# Altium footprint library LimeMicroAltiumLib.PcbLib: 876 footprints (part 46 of 57)
Each footprint in its own frame and in the unit in brackets; x right, y up, seen from the top. Pads: shape width x height; smd on the part's side, far side on the other; paste and mask are expansions set on the pad; w line width, h text height; cw(c..) or ccw(c..) is an arc to the next point about the centre after c.
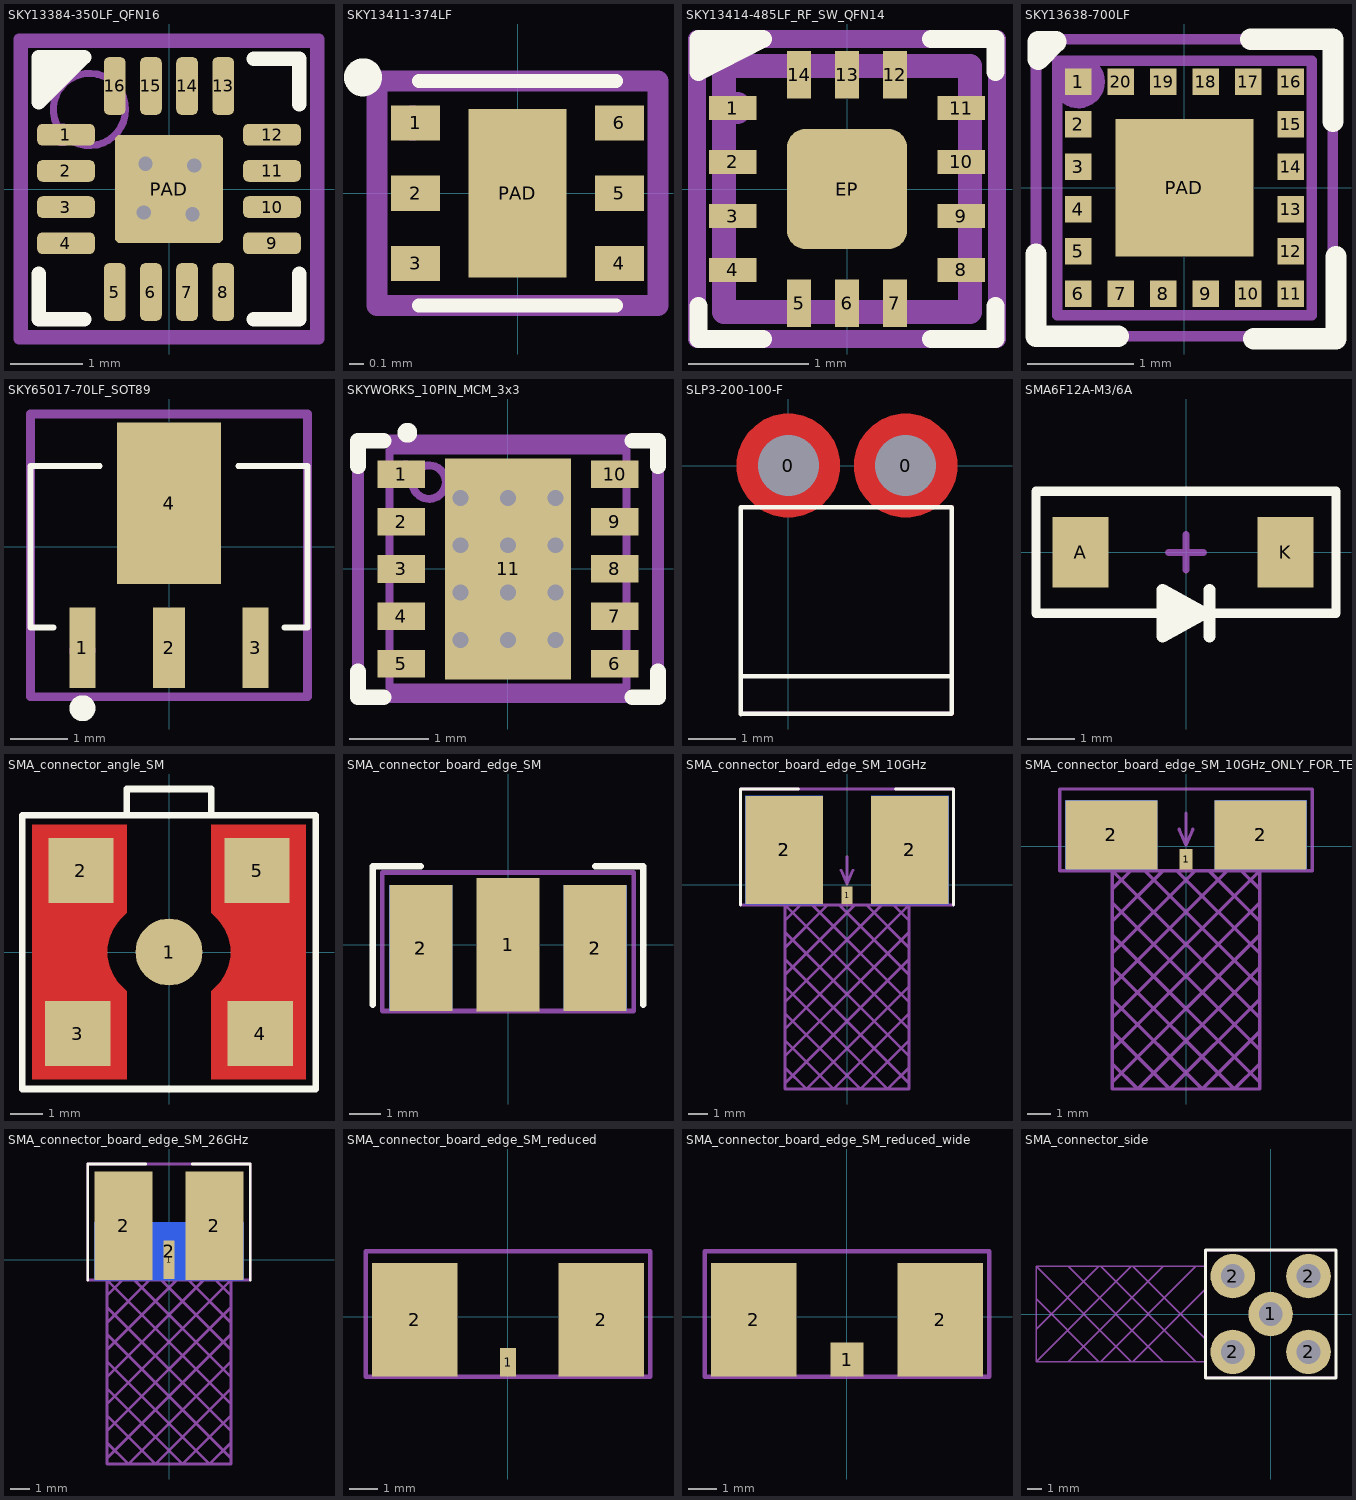
[diagram p45: the footprints below, top view; thin cyan lines are the x and y axes]

## SKY13384-350LF_QFN16 [mm]
pads (17):
  rrect50% 0.8x0.3 smd mask+0.05: 1(-1.425,0.75) 2(-1.425,0.25) 3(-1.425,-0.25) 4(-1.425,-0.75) 9(1.425,-0.75) 10(1.425,-0.25) 11(1.425,0.25) 12(1.425,0.75)
  rrect50% 0.3x0.8 smd mask+0.05: 5(-0.75,-1.425) 6(-0.25,-1.425) 7(0.25,-1.425) 8(0.75,-1.425) 13(0.75,1.425) 14(0.25,1.425) 15(-0.25,1.425) 16(-0.75,1.425)
  rrect10% 1.5x1.5 smd mask+0.05: PAD(0,0)
via -0.325,0.35 diameter 0.4 hole 0.2
via -0.35,-0.325 diameter 0.4 hole 0.2
via 0.325,-0.35 diameter 0.4 hole 0.2
via 0.35,0.325 diameter 0.4 hole 0.2
Top Overlay:
  region: -1.8,1.1 -1.075,1.825 -1.8,1.825
  lines w0.2: -1.8,-1.175 -1.8,-1.8 -1.175,-1.8 ; 1.175,-1.8 1.8,-1.8 1.8,-1.175 ; 1.175,1.8 1.8,1.8 1.8,1.175 ; -1.8,1.2 -1.175,1.825 -1.8,1.825 -1.8,1.2
Mechanical 13:
  circle w0.1: c-1.1,1.1 r0.5
  lines w0.1: -2,-2 -2,2 2,2 2,-2 -2,-2
Mechanical 15:
  circle w0.2: c-1.475,0.75 r0.056
  lines w0.15: -0.5,0 0.5,0 ; 0,-0.5 0,0.5 ; -2.075,-2.075 -2.075,2.075 2.075,2.075 2.075,-2.075 -2.075,-2.075
  text ".Designator" at 0,0 h0.55
3D body "User Library-qfn16-3x3.step": height 0.92, standoff 0, extent -1.5,-1.5 1.5,1.5

## SKY13411-374LF [mm]
pads (7):
  rect 0.35x0.25 smd mask+0.05: 1(-0.725,0.5) 2(-0.725,0) 3(-0.725,-0.5) 4(0.725,-0.5) 5(0.725,0) 6(0.725,0.5)
  rect 0.7x1.2 smd mask+0.05: PAD(0,0)
Top Overlay:
  circle w0.2: c-1.1,0.825 r0.035
  lines w0.1: -0.7,-0.8 0.7,-0.8 ; -0.7,0.8 0.7,0.8
Mechanical 15:
  circle w0.2: c-0.75,0.5 r0.025
  lines w0.15: -0.2,0 0.2,0 ; 0,-0.2 0,0.2 ; -1,-0.8 -1,0.8 1,0.8 1,-0.8 -1,-0.8
  text ".Designator" at 0,0 h0.55
3D body "User Library-DFN 6 2x2_v2.STEP": height 0.48, standoff -0.03, extent -0.752,-0.75 0.751,0.75

## SKY13414-485LF_RF_SW_QFN14 [mm]
pads (15):
  rect 0.395x0.2 smd paste+0 mask+0.05: 1(-0.953,0.675) 2(-0.953,0.225) 3(-0.953,-0.225) 4(-0.953,-0.675) 8(0.953,-0.675) 9(0.953,-0.225) 10(0.953,0.225) 11(0.953,0.675)
  rect 0.2x0.395 smd paste+0 mask+0.05: 5(-0.4,-0.953) 6(0,-0.953) 7(0.4,-0.953) 12(0.4,0.953) 13(0,0.953) 14(-0.4,0.953)
  rrect30% 1x1 smd paste+0 mask+0.05: EP(0,0)
Top Overlay:
  region: -1.237,0.975 -1.237,1.25 -0.7,1.25
  lines w0.15: -1.237,-0.975 -1.237,-1.25 -0.7,-1.25 ; 0.7,-1.25 1.237,-1.25 1.237,-0.975 ; 0.7,1.25 1.237,1.25 1.237,0.975 ; -1.237,0.975 -0.7,1.25 -1.237,1.25 -1.237,0.975
Mechanical 13:
  lines w0.2: -1.025,-1.025 1.025,-1.025 1.025,1.025 -1.025,1.025 -1.025,-1.025
Mechanical 15:
  circle w0.2: c-0.925,0.675 r0.035
  lines w0.15: -0.375,0 0,0 ; 0,-0.375 0,0 ; 0,0.375 0,0 ; 0.375,0 0,0 ; -1.25,-1.25 1.25,-1.25 1.25,1.25 -1.25,1.25 -1.25,-1.25
  text ".Designator" at 0,0 h0.55
3D body "IC_Skyworks_Solutions_SKY13414-485LF_eec.STEP": height 0.25, standoff 0, extent -1.25,-1.25 1.25,1.25

## SKY13638-700LF [mm] "QFN, 20-Leads, Body 4,00x4,00mm, Pitch 0,50mm, Thermal Pad 2,70x2,70mm, IPC Medium Density"
height 0.8
pads (21):
  rect 0.25x0.25 smd mask+0.025: 1(-1,1) 2(-1,0.6) 3(-1,0.2) 4(-1,-0.2) 5(-1,-0.6) 6(-1,-1) 7(-0.6,-1) 8(-0.2,-1) 9(0.2,-1) 10(0.6,-1) 11(1,-1) 12(1,-0.6) 13(1,-0.2) 14(1,0.2) 15(1,0.6) 16(1,1) 17(0.6,1) 18(0.2,1) 19(-0.2,1) 20(-0.6,1)
  rect 1.3x1.3 smd mask+0.05: PAD(0,0)
Top Overlay:
  lines w0.2: -1.4,-0.625 -1.4,-1.4 -0.625,-1.4 ; 0.625,1.4 1.4,1.4 1.4,0.625 ; 0.654,-1.422 1.429,-1.422 1.429,-0.647 ; -1.378,1.213 -1.378,1.378 -1.213,1.378 -1.378,1.213
Mechanical 13:
  circle w0.1: c-1,1 r0.2
  lines w0.1: -1.2,-1.2 -1.2,1.2 1.2,1.2 1.2,-1.2 -1.2,-1.2
Mechanical 15:
  circle w0.35: c-1,1 r0.035
  lines w0.1: -0.5,0 0.5,0 ; 0,-0.5 0,0.5 ; -1.4,-1.4 -1.4,1.4 1.4,1.4 1.4,-1.4 -1.4,-1.4
  text ".Designator" at 0,0 h0.55
3D body: height 0.4, standoff 0, extent -1.2,-1.2 1.2,1.2

## SKY65017-70LF_SOT89 [mm]
pads (4):
  rect 0.45x1.4 smd mask+0.05: 1(-1.5,-1.75) 3(1.5,-1.75)
  rect 0.55x1.4 smd mask+0.05: 2(0,-1.75)
  rect 1.8x2.8 smd mask+0.05: 4(0,0.75)
Top Overlay:
  circle w0.25: c-1.5,-2.8 r0.1
  lines w0.1: -2,-1.4 -2.4,-1.4 -2.4,1.4 -1.2,1.4 ; 1.2,1.4 2.4,1.4 2.4,-1.4 2,-1.4
Mechanical 15:
  circle w0.25: c-1.5,-1.8 r0.1
  lines w0.15: -0.2,0 0.2,0 ; 0,-0.2 0,0.2 ; -2.4,-2.6 2.4,-2.6 2.4,2.3 -2.4,2.3 -2.4,-2.6
  text ".Designator" at 0,0 h0.55
3D body "SW3dPS-SOT89.STEP": height 1.59, standoff -0.02, extent -2.314,-2.258 2.286,1.992

## SKYWORKS_10PIN_MCM_3x3 [mm]
height 0.8
pads (11):
  rect 0.6x0.35 smd mask+0.05: 1(-1.35,1.2) 2(-1.35,0.6) 3(-1.35,0) 4(-1.35,-0.6) 5(-1.35,-1.2) 6(1.35,-1.2) 7(1.35,-0.6) 8(1.35,0) 9(1.35,0.6) 10(1.35,1.2)
  rect 1.6x2.8 smd mask+0.05: 11(0,0)
via -0.6,-0.9 diameter 0.4 hole 0.2
via 0,-0.9 diameter 0.4 hole 0.2
via 0.6,-0.9 diameter 0.4 hole 0.2
via -0.6,-0.3 diameter 0.4 hole 0.2
via 0.6,-0.3 diameter 0.4 hole 0.2
via 0,-0.3 diameter 0.4 hole 0.2
via -0.6,0.3 diameter 0.4 hole 0.2
via 0,0.3 diameter 0.4 hole 0.2
via 0.6,0.3 diameter 0.4 hole 0.2
via -0.6,0.9 diameter 0.4 hole 0.2
via 0,0.9 diameter 0.4 hole 0.2
via 0.6,0.9 diameter 0.4 hole 0.2
Top Overlay:
  circle w0.2: c-1.275,1.725 r0.025
  lines w0.2: -1.9,-1.3 -1.9,-1.625 -1.575,-1.625 ; -1.9,1.3 -1.9,1.625 -1.575,1.625 ; 1.575,-1.625 1.9,-1.625 1.9,-1.3 ; 1.575,1.625 1.9,1.625 1.9,1.3
Mechanical 13:
  circle w0.1: c-1,1.1 r0.212
  lines w0.1: -1.5,-1.5 1.5,-1.5 1.5,1.5 -1.5,1.5 -1.5,-1.5
Mechanical 15:
  circle w0.35: c-1.3,1.2 r0
  lines w0.15: -0.5,0 0.5,0 ; 0,-0.5 0,0.5 ; -1.9,-1.625 1.9,-1.625 1.9,1.625 -1.9,1.625 -1.9,-1.625
  text ".Designator" at 0,0 h0.55
3D body: height 0.9, standoff 0, extent -1.5,-1.5 1.5,1.5

## SLP3-200-100-F [mm]
pads (2):
  round 0.9 hole 1.3 unplated: 0(0,0) 0(2.5,0)
Top Layer:
  pour cut-out: 0,0 0,1.1 0.108,1.1 0.321,1.058 0.521,0.975 0.701,0.854 0.854,0.701 0.975,0.521 1.058,0.321 1.1,0.108 1.1,0
  pour cut-out: 0,0 0,-1.1 -0.108,-1.1 -0.321,-1.058 -0.521,-0.975 -0.701,-0.854 -0.854,-0.701 -0.975,-0.521 -1.058,-0.321 -1.1,-0.108 -1.1,0
  pour cut-out: 0,0 -1.1,0 -1.1,0.108 -1.058,0.321 -0.975,0.521 -0.854,0.701 -0.701,0.854 -0.521,0.975 -0.321,1.058 -0.108,1.1 0,1.1
  pour cut-out: 0,0 1.1,0 1.1,-0.108 1.058,-0.321 0.975,-0.521 0.854,-0.701 0.701,-0.854 0.521,-0.975 0.321,-1.058 0.108,-1.1 0,-1.1
  pour cut-out: 2.5,0 2.5,1.1 2.608,1.1 2.821,1.058 3.021,0.975 3.201,0.854 3.354,0.701 3.475,0.521 3.558,0.321 3.6,0.108 3.6,0
  pour cut-out: 2.5,0 2.5,-1.1 2.392,-1.1 2.179,-1.058 1.979,-0.975 1.799,-0.854 1.646,-0.701 1.525,-0.521 1.442,-0.321 1.4,-0.108 1.4,0
  pour cut-out: 2.5,0 1.4,0 1.4,0.108 1.442,0.321 1.525,0.521 1.646,0.701 1.799,0.854 1.979,0.975 2.179,1.058 2.392,1.1 2.5,1.1
  pour cut-out: 2.5,0 3.6,0 3.6,-0.108 3.558,-0.321 3.475,-0.521 3.354,-0.701 3.201,-0.854 3.021,-0.975 2.821,-1.058 2.608,-1.1 2.5,-1.1
Top Overlay:
  lines w0.1: -1.016,-4.5 3.484,-4.489 3.484,-0.889 -1.016,-0.889 -1.016,-4.489 -1.016,-5.3 3.484,-5.289 3.484,-4.478
Top Solder:
  region: 1.1,0 1.1,0.108 1.058,0.321 0.975,0.521 0.854,0.701 0.701,0.854 0.521,0.975 0.321,1.058 0.108,1.1 0,1.1 0,0
  region: 0,1.1 -0.108,1.1 -0.321,1.058 -0.521,0.975 -0.701,0.854 -0.854,0.701 -0.975,0.521 -1.058,0.321 -1.1,0.108 -1.1,0 0,0
  region: -1.1,0 -1.1,-0.108 -1.058,-0.321 -0.975,-0.521 -0.854,-0.701 -0.701,-0.854 -0.521,-0.975 -0.321,-1.058 -0.108,-1.1 0,-1.1 0,0
  region: 0,-1.1 0.108,-1.1 0.321,-1.058 0.521,-0.975 0.701,-0.854 0.854,-0.701 0.975,-0.521 1.058,-0.321 1.1,-0.108 1.1,0 0,0
  region: 3.6,0 3.6,0.108 3.558,0.321 3.475,0.521 3.354,0.701 3.201,0.854 3.021,0.975 2.821,1.058 2.608,1.1 2.5,1.1 2.5,0
  region: 2.5,1.1 2.392,1.1 2.179,1.058 1.979,0.975 1.799,0.854 1.646,0.701 1.525,0.521 1.442,0.321 1.4,0.108 1.4,0 2.5,0
  region: 1.4,0 1.4,-0.108 1.442,-0.321 1.525,-0.521 1.646,-0.701 1.799,-0.854 1.979,-0.975 2.179,-1.058 2.392,-1.1 2.5,-1.1 2.5,0
  region: 2.5,-1.1 2.608,-1.1 2.821,-1.058 3.021,-0.975 3.201,-0.854 3.354,-0.701 3.475,-0.521 3.558,-0.321 3.6,-0.108 3.6,0 2.5,0
Mechanical 15:
  lines w0.076: -1.016,-5.289 -1.016,-0.889 3.484,-0.889 3.484,-5.289 -1.016,-5.289
3D body "SLP3-200-100-F--3DModel-STEP-56544.STEP": height 6.62, standoff -1.59, extent -1.041,-7.823 3.48,1.067

## SMA6F12A-M3/6A [mm]
pads (2):
  rect 1.2x1.5 smd: A(-2.25,0) K(2.125,0)
Top Overlay:
  lines w0.2: -3.2,-1.3 -3.2,1.3 3.2,1.3 3.2,-1.3 -3.2,-1.3
  lines w0.254: -0.5,-1.5 -0.1,-1.5 ; -0.5,-1.3 -0.3,-1.3 0.4,-1.3 ; -0.5,-1.1 0,-1.1 ; 0.5,-1.8 0.5,-0.8 ; 0.4,-1.3 -0.5,-1.8 -0.5,-0.8 0.4,-1.3
Mechanical 15:
  lines w0.15: -0.5,-1.3 -0.3,-1.3 0.4,-1.3 ; -0.375,0 0,0 ; 0,-0.375 0,0 ; 0,0.375 0,0 ; 0.375,0 0,0 ; 0.5,-1.8 0.5,-0.8 ; 0.4,-1.3 -0.5,-0.8 -0.5,-1.8 0.4,-1.3 ; -3.2,-1.3 3.2,-1.3 3.2,1.3 -3.2,1.3 -3.2,-1.3
  text ".Designator" at 0,0 h0.55
  text "C" at 2.15,-0.3 h0.55
  text "A" at -2.375,-0.3 h0.55

## SMA_connector_angle_SM [mm]
pads (5):
  round 2.05 smd: 1(0,0)
  rect 2x2 smd: 2(-2.7,2.5) 3(-2.8,-2.5) 4(2.8,-2.5) 5(2.7,2.5)
Top Layer:
  region: -1.3,-3.9 -4.2,-3.9 -4.2,3.9 -1.3,3.9 -1.3,1.2 -1.476,1.024 -1.571,0.919 -1.729,0.683 -1.838,0.42 -1.893,0.142 -1.9,0 -1.893,-0.142 -1.838,-0.42 -1.729,-0.683 -1.571,-0.919 -1.476,-1.024 -1.3,-1.2
  region: 1.3,-3.9 4.2,-3.9 4.2,3.9 1.3,3.9 1.3,1.2 1.476,1.024 1.571,0.919 1.729,0.683 1.838,0.42 1.893,0.142 1.9,0 1.893,-0.142 1.838,-0.42 1.729,-0.683 1.571,-0.919 1.476,-1.024 1.3,-1.2
Top Overlay:
  lines w0.2: -1.3,4.2 -1.3,5 1.3,5 1.3,4.2 ; -4.5,-4.2 4.5,-4.2 4.5,4.2 -4.5,4.2 -4.5,-4.2
Mechanical 15:
  lines w0.15: -1.3,4.2 -1.3,5 1.3,5 1.3,4.2 ; -0.5,0 0,0 ; 0,-0.5 0,0 ; 0,0.5 0,0 ; 0.5,0 0,0 ; -4.5,-4.2 4.5,-4.2 4.5,4.2 -4.5,4.2 -4.5,-4.2
  text ".Designator" at 0,0 h0.55
3D body "User Library-Con, 142-0711-201.STEP": height 8.84, standoff 0, extent -3.233,-3.233 3.234,3.234

## SMA_connector_board_edge_SM [mm]
pads (5):
  rect 2x4.25 smd: 1(0,0)
  rect 2x4 smd: 2(-2.77,-0.1) 2(2.77,-0.1)
  rect 2x4 smd far side: 2(-2.77,-0.1) 2(2.77,-0.1)
Top Overlay:
  lines w0.2: -4.3,-1.9 -4.3,2.5 -2.775,2.5 ; 2.775,2.5 4.3,2.5 4.3,-1.9
Mechanical 15:
  lines w0.15: -4,-2.1 -4,2.3 4,2.3 4,-2.1 -4,-2.1
  text "PCB edge" at -2.2,-2.1 h0.55
  text ".Designator" at 0,0 h0.55
3D body "User Library-620-SMA-02-112-TGG SMA Female for PCB edge Mount.step": height 3.4, standoff -2.65, extent -3,-11.8 3,1.8

## SMA_connector_board_edge_SM_10GHz [mm]
pads (5):
  rect 0.55x0.9 smd mask+0.05: 1(0,-0.55)
  rect 4x5.6 smd mask+0.05: 2(-3.25,1.8) 2(3.25,1.8)
  rect 4x5.6 smd far side mask+0.05: 2(-3.25,1.8) 2(3.25,1.8)
Top Overlay:
  lines w0.15: -5.5,-1.05 -5.5,4.95 -2.5,4.95 ; 2.5,4.95 5.5,4.95 5.5,-1.05
Mechanical 1:
  lines w0.15: -3.2,-10.25 3.2,-3.85 ; -3.2,-9.45 -2.1,-10.55 3.2,-5.25 ; -3.2,-8.85 3.2,-2.45 ; -3.2,-8.05 -0.7,-10.55 3.2,-6.65 ; -3.2,-7.45 3.2,-1.05 ; -3.2,-6.65 0.7,-10.55 3.2,-8.05 ; -3.2,-6.05 1.8,-1.05 ; -3.2,-5.25 2.1,-10.55 3.2,-9.45 ; -3.2,-4.65 0.4,-1.05 ; -3.2,-3.85 3.2,-10.25 ; -3.2,-3.25 -1,-1.05 ; -3.2,-2.45 3.2,-8.85 ; -3.2,-1.85 -2.4,-1.05 ; -1.8,-1.05 3.2,-6.05 ; -0.4,-1.05 3.2,-4.65 ; 1,-1.05 3.2,-3.25 ; 2.4,-1.05 3.2,-1.85 ; 3.2,-7.85 3.2,-7.45 -3.2,-1.05 ; -3.2,-1.05 3.2,-1.05 ; -3.2,-1.05 -3.2,-10.55 3.2,-10.55 3.2,-1.05
Mechanical 15:
  lines w0.15: -0.3,0.75 0,0.05 ; 0,1.45 0,0.05 ; 0.3,0.75 0,0.05 ; -5.5,-1.05 -5.5,4.95 5.5,4.95 5.5,-1.05 -5.5,-1.05
  text ".Designator" at 0,1.8 h0.55
  text "Board edge" at -2.8,-0.7 h0.55
3D body "142-0701-841.stp": height 3.96, standoff -3.96, extent -4.763,-10.475 4.763,3.8

## SMA_connector_board_edge_SM_10GHz_ONLY_FOR_TEST [mm]
pads (5):
  rect 0.55x0.9 smd mask+0.05: 1(0,-0.55)
  rect 4x3 smd mask+0.05: 2(-3.25,0.5) 2(3.25,0.5)
  rect 4x3 smd far side mask+0.05: 2(-3.25,0.5) 2(3.25,0.5)
Mechanical 1:
  lines w0.15: -3.2,-10.25 3.2,-3.85 ; -3.2,-9.45 -2.1,-10.55 3.2,-5.25 ; -3.2,-8.85 3.2,-2.45 ; -3.2,-8.05 -0.7,-10.55 3.2,-6.65 ; -3.2,-7.45 3.2,-1.05 ; -3.2,-6.65 0.7,-10.55 3.2,-8.05 ; -3.2,-6.05 1.8,-1.05 ; -3.2,-5.25 2.1,-10.55 3.2,-9.45 ; -3.2,-4.65 0.4,-1.05 ; -3.2,-3.85 3.2,-10.25 ; -3.2,-3.25 -1,-1.05 ; -3.2,-2.45 3.2,-8.85 ; -3.2,-1.85 -2.4,-1.05 ; -1.8,-1.05 3.2,-6.05 ; -0.4,-1.05 3.2,-4.65 ; 1,-1.05 3.2,-3.25 ; 2.4,-1.05 3.2,-1.85 ; 3.2,-7.85 3.2,-7.45 -3.2,-1.05 ; -3.2,-1.05 3.2,-1.05 ; -3.2,-1.05 -3.2,-10.55 3.2,-10.55 3.2,-1.05
Mechanical 15:
  lines w0.15: -0.3,0.75 0,0.05 ; 0,1.45 0,0.05 ; 0.3,0.75 0,0.05 ; -5.5,-1.05 -5.5,2.5 5.5,2.5 5.5,-1.05 -5.5,-1.05
  text ".Designator" at 0,1.8 h0.55
  text "Board edge" at -2.8,-0.7 h0.55
3D body "142-0701-841.stp": height 3.96, standoff -3.96, extent -4.763,-10.475 4.763,3.8

## SMA_connector_board_edge_SM_26GHz [mm]
pads (4):
  rect 0.55x2 smd mask+0.05: 1(0,0)
  rect 3x5.6 smd mask+0.05: 2(-2.35,1.75) 2(2.35,1.75)
  rect 7.7x3 smd far side mask+0.05: 2(0,0.45)
Top Overlay:
  lines w0.15: -4.2,-1.05 -4.2,4.95 -1.2,4.95 ; 1.2,4.95 4.2,4.95 4.2,-1.05
Mechanical 1:
  lines w0.15: -3.2,-10.25 3.2,-3.85 ; -3.2,-9.45 -2.1,-10.55 3.2,-5.25 ; -3.2,-8.85 3.2,-2.45 ; -3.2,-8.05 -0.7,-10.55 3.2,-6.65 ; -3.2,-7.45 3.2,-1.05 ; -3.2,-6.65 0.7,-10.55 3.2,-8.05 ; -3.2,-6.05 1.8,-1.05 ; -3.2,-5.25 2.1,-10.55 3.2,-9.45 ; -3.2,-4.65 0.4,-1.05 ; -3.2,-3.85 3.2,-10.25 ; -3.2,-3.25 -1,-1.05 ; -3.2,-2.45 3.2,-8.85 ; -3.2,-1.85 -2.4,-1.05 ; -1.8,-1.05 3.2,-6.05 ; -0.4,-1.05 3.2,-4.65 ; 1,-1.05 3.2,-3.25 ; 2.4,-1.05 3.2,-1.85 ; 3.2,-7.85 3.2,-7.45 -3.2,-1.05 ; -3.2,-1.05 3.2,-1.05 ; -3.2,-1.05 -3.2,-10.55 3.2,-10.55 3.2,-1.05
Mechanical 15:
  lines w0.15: -0.3,0.75 0,0.05 ; 0,1.45 0,0.05 ; 0.3,0.75 0,0.05 ; -4.2,-1.05 -4.2,4.95 4.2,4.95 4.2,-1.05 -4.2,-1.05
  text ".Designator" at 0,1.8 h0.55
  text "Board edge" at -2.8,-0.7 h0.55
3D body "142-0761-871.stp": height 3.47, standoff -2.88, extent -3.175,-10.525 3.175,3.547

## SMA_connector_board_edge_SM_reduced [mm]
pads (3):
  rect 0.55x1 smd: 1(0,-1.6)
  rect 3x4 smd: 2(-3.27,-0.1) 2(3.27,-0.1)
Mechanical 15:
  lines w0.15: -5,-2.1 5,-2.1 5,2.3 -5,2.3 -5,-2.1
  text ".Designator" at 0,0 h0.55
  text "PCB edge" at -2.2,-2.1 h0.55
3D body "142-0701-841.stp": height 4.06, standoff -3.86, extent -4.762,-12.525 4.763,1.75

## SMA_connector_board_edge_SM_reduced_wide [mm]
pads (3):
  rect 1.15x1.2 smd: 1(0,-1.5)
  rect 3x4 smd: 2(-3.27,-0.1) 2(3.27,-0.1)
Mechanical 15:
  lines w0.15: -5,-2.1 5,-2.1 5,2.3 -5,2.3 -5,-2.1
  text ".Designator" at 0,0 h0.55
  text "PCB edge" at -2.2,-2.1 h0.55
3D body "142-0701-841.stp": height 4.06, standoff -3.86, extent -4.762,-12.525 4.763,1.75

## SMA_connector_side [mm]
pads (5):
  round 3 hole 1.6: 1(0,0) 2(-2.55,-2.55) 2(-2.55,2.55) 2(2.55,-2.55) 2(2.55,2.55)
Top Overlay:
  lines w0.2: -4.4,-4.3 -4.4,4.3 4.4,4.3 4.4,-4.3 -4.4,-4.3
Mechanical 15:
  lines w0.1: -15.8,-1.025 -11.575,3.2 ; -15.8,1.025 -11.575,-3.2 ; -13.625,-3.2 -7.225,3.2 ; -13.625,3.2 -7.225,-3.2 ; -11.45,-3.2 -5.05,3.2 ; -11.45,3.2 -5.05,-3.2 ; -9.4,-3.2 -15.8,3.2 ; -9.4,3.2 -15.8,-3.2 ; -9.275,-3.2 -4.4,1.675 ; -9.275,3.2 -4.4,-1.675 ; -4.4,-3.2 -15.8,-3.2 ; -4.4,3.2 -15.8,3.2 ; -15.8,-3.2 -15.8,3.2
  lines w0.15: -4.25,-4.3 4.25,-4.3 ; -0.5,0 0,0 ; 0,-0.5 0,0 ; 0,0.5 0,0 ; 0.5,0 0,0 ; -4.4,-4.3 -4.4,4.3 4.4,4.3 4.4,-4.3 -4.4,-4.3
  text "Connector out" at -1.7,-3.35 h0.8
  text ".Designator" at 0,0 h0.55
3D body "User Library-SMA-RIGHTANGLE-TE.step": height 9.6, standoff -3.9, extent -15.8,-3.2 3.2,3.2